# Altium footprint library PcbLib1.PcbLib: 37 footprints (part 2 of 3)
Each footprint in its own frame and in the unit in brackets; x right, y up, seen from the top. Pads: shape width x height; smd on the part's side, far side on the other; paste and mask are expansions set on the pad; w line width, h text height; cw(c..) or ccw(c..) is an arc to the next point about the centre after c.
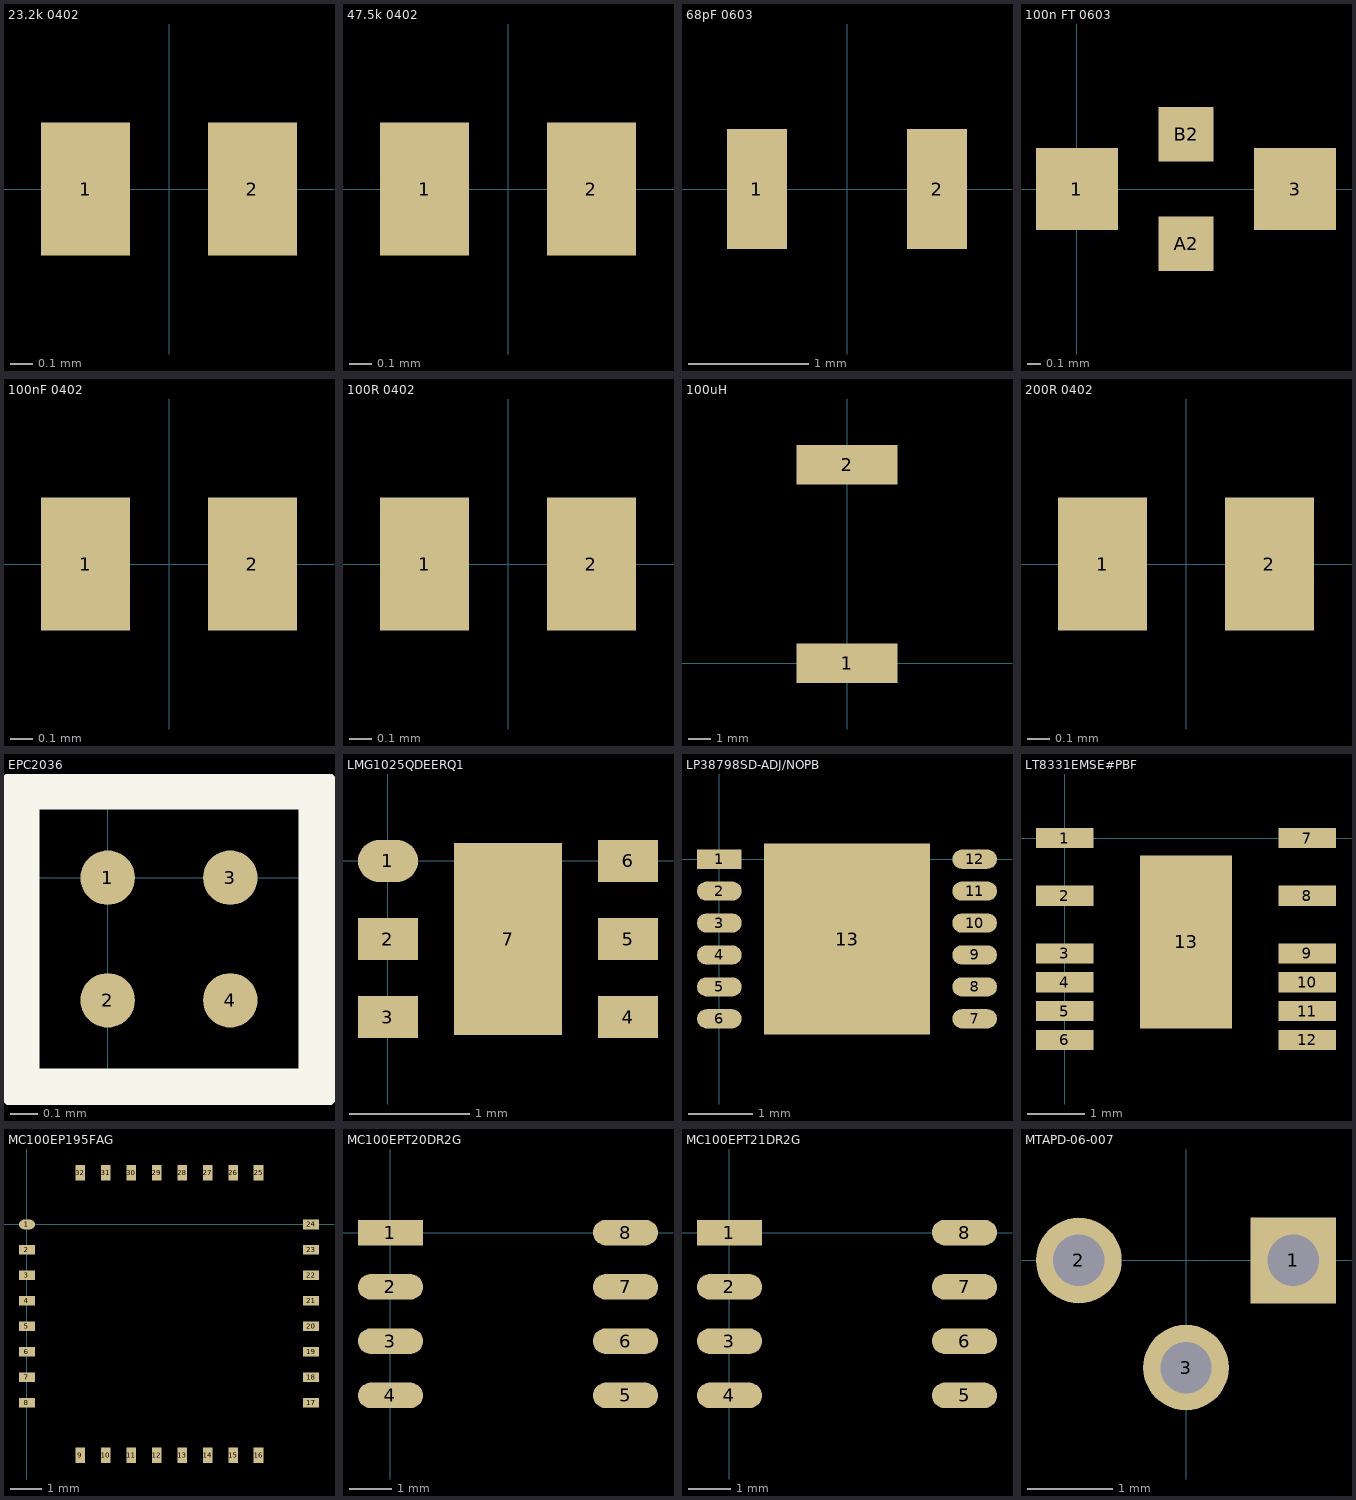
[diagram p1: the footprints below, top view; thin cyan lines are the x and y axes]

## 23.2k 0402 [mm] "CR0402-FX-2322GLF"
pads (2):
  rect 0.4x0.6 smd: 1(-0.375,0) 2(0.375,0)
3D body "CR0402-FX-2322GLF.stp": height 0.36, standoff 0.01, extent -0.5,-0.25 0.5,0.25

## 47.5k 0402 [mm] "CR0402-FX-4752GLF"
pads (2):
  rect 0.4x0.6 smd: 1(-0.375,0) 2(0.375,0)
3D body "CR0402-FX-4752GLF.stp": height 0.36, standoff 0.01, extent -0.5,-0.25 0.5,0.25

## 68pF 0603 [mm]
pads (2):
  rect 0.5x1 smd: 1(-0.75,0) 2(0.75,0)
3D body "C0603X222K1REC7411.stp": height 0.88, standoff 0.01, extent -0.875,-0.475 0.875,0.475

## 100n FT 0603 [mm] "NFM18PC104R1C3D"
pads (4):
  rect 0.6x0.6 smd: 1(0,0) 3(1.6,0)
  rect 0.4x0.4 smd: A2(0.8,-0.4) B2(0.8,0.4)
3D body "NFM18PC104R1C3D.stp": height 0.61, standoff 0.01, extent 0.025,-0.4 1.625,0.4

## 100nF 0402 [mm] "C1005X7R1E104K050BB"
pads (2):
  rect 0.4x0.6 smd: 1(-0.375,0) 2(0.375,0)
3D body "C1005X7R1E104K050BB.stp": height 0.51, standoff 0.01, extent -0.475,-0.25 0.525,0.25

## 100R 0402 [mm] "ERA-2VEB1000X"
pads (2):
  rect 0.4x0.6 smd: 1(-0.375,0) 2(0.375,0)
3D body "ERA-2VEB1000X.stp": height 0.37, standoff 0.01, extent -0.5,-0.25 0.5,0.25

## 100uH [mm] "744066101"
pads (2):
  rect 4.6x1.8 smd: 1(0,0) 2(0,9)
3D body "744066101.stp": height 3.81, standoff 0.01, extent -5,-0.5 5,9.5

## 200R 0402 [mm] "ERA-2AED201X"
pads (2):
  rect 0.4x0.6 smd: 1(-0.375,0) 2(0.375,0)
3D body "ERA-2AED201X.stp": height 0.36, standoff 0.01, extent -0.5,-0.25 0.5,0.25

## EPC2036 [mm]
pads (4):
  round 0.2 smd: 1(0,0) 2(0,-0.45) 3(0.45,0) 4(0.45,-0.45)
Top Overlay:
  lines w0.15: -0.325,-0.775 0.775,-0.775 0.775,0.325 -0.325,0.325 -0.325,-0.775
3D body "EPC2036.stp": height 0.93, standoff 0.01, extent -0.225,-0.675 0.675,0.225

## LMG1025QDEERQ1 [mm]
pads (7):
  oval 0.5x0.35 smd: 1(0,0)
  rect 0.5x0.35 smd: 2(0,-0.65) 3(0,-1.3) 4(2,-1.3) 5(2,-0.65) 6(2,0)
  rect 0.9x1.6 smd: 7(1,-0.65)
3D body "LMG1025QDEERQ1.stp": height 0.79, standoff 0.01, extent 0,-1.65 2,0.35

## LP38798SD-ADJ/NOPB [mm]
pads (13):
  rect 0.7x0.3 smd: 1(0,0)
  oval 0.7x0.3 smd: 2(0,-0.5) 3(0,-1) 4(0,-1.5) 5(0,-2) 6(0,-2.5) 7(4,-2.5) 8(4,-2) 9(4,-1.5) 10(4,-1) 11(4,-0.5) 12(4,0)
  rect 2.6x3 smd: 13(2,-1.25)
3D body "LP38798SD-ADJ_NOPB.stp": height 0.99, standoff 0.01, extent 0,-3.25 4,0.75

## LT8331EMSE#PBF [mm]
pads (13):
  rect 1x0.35 smd: 1(0,0) 2(0,-1) 3(0,-2) 4(0,-2.5) 5(0,-3) 6(0,-3.5) 7(4.2,0) 8(4.2,-1) 9(4.2,-2) 10(4.2,-2.5) 11(4.2,-3) 12(4.2,-3.5)
  rect 1.6x3 smd: 13(2.1,-1.8)
3D body "LT8331EMSE#PBF.stp": height 0.89, standoff -0.07, extent -0.362,-3.769 4.562,0.27

## MC100EP195FAG [mm]
pads (32):
  oval 0.5x0.3 smd: 1(0,0)
  rect 0.5x0.3 smd: 2(0,-0.8) 3(0,-1.6) 4(0,-2.4) 5(0,-3.2) 6(0,-4) 7(0,-4.8) 8(0,-5.6) 17(8.925,-5.6) 18(8.925,-4.8) 19(8.925,-4) 20(8.925,-3.2) 21(8.925,-2.4) 22(8.925,-1.6) 23(8.925,-0.8) 24(8.925,0)
  rect 0.3x0.5 smd: 9(1.675,-7.25) 10(2.475,-7.25) 11(3.275,-7.25) 12(4.075,-7.25) 13(4.875,-7.25) 14(5.675,-7.25) 15(6.475,-7.25) 16(7.275,-7.25) 25(7.275,1.625) 26(6.475,1.625) 27(5.675,1.625) 28(4.875,1.625) 29(4.075,1.625) 30(3.275,1.625) 31(2.475,1.625) 32(1.675,1.625)
3D body "MC100EP195FAG.stp": height 1.61, standoff 0.01, extent -0.025,-7.3 8.975,1.7

## MC100EPT20DR2G [mm]
pads (8):
  rect 1.52x0.6 smd: 1(0,0)
  oval 1.52x0.6 smd: 2(0,-1.27) 3(0,-2.54) 4(0,-3.81) 5(5.5,-3.81) 6(5.5,-2.54) 7(5.5,-1.27) 8(5.5,0)
3D body "MC100EPT21DR2G.stp": height 1.76, standoff 0.01, extent -0.225,-4.375 5.775,0.525

## MC100EPT21DR2G [mm]
pads (8):
  rect 1.52x0.6 smd: 1(0,0)
  oval 1.52x0.6 smd: 2(0,-1.27) 3(0,-2.54) 4(0,-3.81) 5(5.5,-3.81) 6(5.5,-2.54) 7(5.5,-1.27) 8(5.5,0)
3D body "MC100EPT21DR2G.stp": height 1.76, standoff 0.01, extent -0.225,-4.375 5.775,0.525

## MTAPD-06-007 [mm]
pads (3):
  rect 1x1 / inner rect 1.8x1.8 / far side rect 1x1 hole 0.6: 1(1.25,0)
  round 1 / inner rect 1.8x1.8 / far side round 1 hole 0.6: 2(-1.25,0) 3(0,-1.25)
3D body "MTAPD-06-016.stp": height 3.76, standoff -13.99, extent -3.54,-2.668 2.671,2.668